# Altium footprint library STPMotorControl_1.PcbLib: 84 footprints (part 1 of 6)
Each footprint in its own frame and in the unit in brackets; x right, y up, seen from the top. Pads: shape width x height; smd on the part's side, far side on the other; paste and mask are expansions set on the pad; w line width, h text height; cw(c..) or ccw(c..) is an arc to the next point about the centre after c.
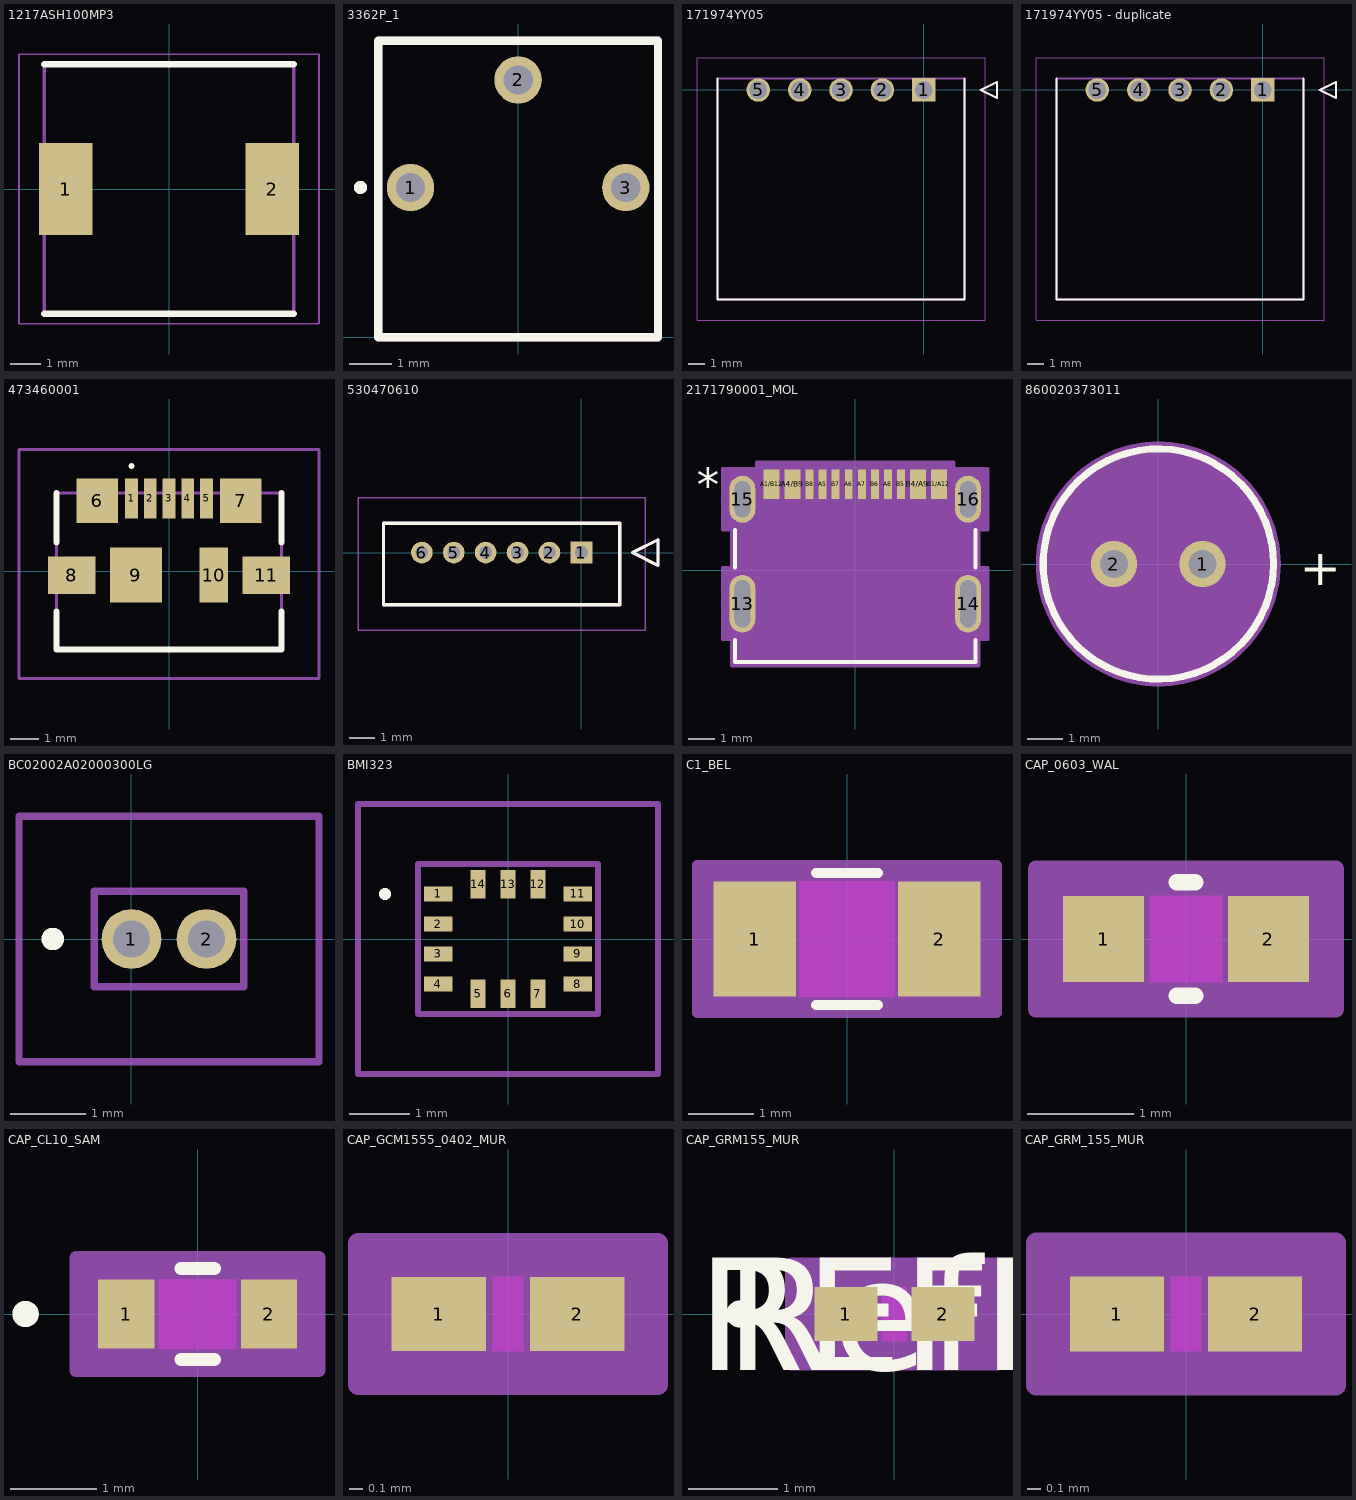
[diagram p0: the footprints below, top view; thin cyan lines are the x and y axes]

## 1217ASH100MP3 [mm]
pads (2):
  rect 1.75x3 smd: 1(-3.375,0) 2(3.375,0)
Top Overlay:
  lines w0.2: -4.075,-4.075 4.075,-4.075 ; -4.075,4.075 4.075,4.075
Mechanical 13:
  lines w0.1: -4.075,-4.075 -4.075,4.075 4.075,4.075 4.075,-4.075 -4.075,-4.075
Mechanical 15:
  lines w0.05: -4.9,-4.4 -4.9,4.4 4.9,4.4 4.9,-4.4 -4.9,-4.4
3D body "1217AS-H-150M=P3.stp": height 4.5, standoff 0.01, extent -4.33,-4.31 4.33,4.313

## 3362P_1 [mm]
pads (3):
  round 1.12 hole 0.69: 1(-2.54,3.53) 2(0,6.07) 3(2.54,3.53)
Top Overlay:
  circle w0.2: c-3.722,3.532 r0.057
  lines w0.2: -3.3,0 -3.3,6.99 3.3,6.99 3.3,0 -3.3,0
Mechanical 13:
  lines w0.2: -3.3,0 3.3,0 3.3,6.99 -3.3,6.99 -3.3,0
3D body "3362P-1-303LF.stp": height 4.65, standoff -4.85, extent -3.3,0 3.3,6.99

## 171974YY05 [mm]
pads (5):
  rect 1.44x1.44 hole 1.09: 1(0,0)
  round 1.44 hole 1.09: 2(-2.54,0) 3(-5.08,0) 4(-7.62,0) 5(-10.16,0)
Top Overlay:
  lines w0.127: -12.66,0.71 -12.66,-12.88 2.5,-12.88 2.5,0.71 ; 3.5,0 4.5,-0.5 4.5,0.5 3.5,0
Mechanical 13:
  lines w0.127: -12.66,-12.88 2.5,-12.88 2.5,0.71 -12.66,0.71 -12.66,-12.88 ; 3.5,0 4.5,-0.5 4.5,0.5 3.5,0
Mechanical 15:
  lines w0.05: -13.93,-14.15 3.77,-14.15 3.77,1.98 -13.93,1.98 -13.93,-14.15
3D body "1719740105.stp": height 7.28, standoff -3.39, extent -12.63,-12.88 2.53,0.71

## 171974YY05 - duplicate [mm]
pads (5):
  rect 1.44x1.44 hole 1.09: 1(0,0)
  round 1.44 hole 1.09: 2(-2.54,0) 3(-5.08,0) 4(-7.62,0) 5(-10.16,0)
Top Overlay:
  lines w0.127: -12.66,0.71 -12.66,-12.88 2.5,-12.88 2.5,0.71 ; 3.5,0 4.5,-0.5 4.5,0.5 3.5,0
Mechanical 13:
  lines w0.127: -12.66,-12.88 2.5,-12.88 2.5,0.71 -12.66,0.71 -12.66,-12.88 ; 3.5,0 4.5,-0.5 4.5,0.5 3.5,0
Mechanical 15:
  lines w0.05: -13.93,-14.15 3.77,-14.15 3.77,1.98 -13.93,1.98 -13.93,-14.15
3D body "1719740105.stp": height 7.28, standoff -3.39, extent -12.63,-12.88 2.53,0.71

## 473460001 [mm]
pads (11):
  rect 0.45x1.38 smd: 1(-1.3,2.525) 2(-0.65,2.525) 3(0,2.525) 4(0.65,2.525) 5(1.3,2.525)
  rect 1.425x1.55 smd: 6(-2.487,2.44) 7(2.487,2.44)
  rect 1.65x1.3 smd: 8(-3.375,-0.135) 11(3.375,-0.135)
  rect 1.8x1.9 smd: 9(-1.15,-0.135)
  rect 1x1.9 smd: 10(1.55,-0.135)
Top Overlay:
  lines w0.1: -1.3,3.6 ccw(c-1.3,3.65) -1.3,3.7 ; -1.3,3.6 cw(c-1.3,3.65) -1.3,3.7 ; -1.3,3.6 ccw(c-1.3,3.65) -1.3,3.7
  lines w0.2: -3.9,-1.4 -3.9,-2.715 3.9,-2.715 3.9,-1.4 ; -3.9,1 -3.9,2.715 ; 3.9,1 3.9,2.715
Mechanical 13:
  lines w0.1: -3.9,-2.715 -3.9,2.715 3.9,2.715 3.9,-2.715 -3.9,-2.715
Mechanical 15:
  lines w0.1: -5.2,-3.715 -5.2,4.215 5.2,4.215 5.2,-3.715 -5.2,-3.715
3D body "47346-0001.stp": height 2.72, standoff -0.22, extent -3.99,-3.26 3.99,2.17

## 530470610 [mm]
pads (6):
  rect 0.85x0.85 hole 0.5: 1(0,0)
  round 0.85 hole 0.5: 2(-1.25,0) 3(-2.5,0) 4(-3.75,0) 5(-5,0) 6(-6.25,0)
Top Overlay:
  lines w0.127: -7.75,-2.05 -7.75,1.15 1.5,1.15 1.5,-2.05 -7.75,-2.05 ; 2,0 3,0.5 3,-0.5 2,0
Mechanical 13:
  lines w0.127: -7.75,-2.05 -7.75,1.15 1.5,1.15 1.5,-2.05 -7.75,-2.05 ; 2,0 3,0.5 3,-0.5 2,0
Mechanical 15:
  lines w0.05: -8.75,-3.05 -8.75,2.15 2.5,2.15 2.5,-3.05 -8.75,-3.05
3D body "0530470610.stp": height 4.28, standoff -2.22, extent -7.755,-2.04 1.495,1.16

## 2171790001_MOL [mil]
pads (16):
  oval 39x87 hole 71 slot 24 at 0 deg paste-99999 mask-43.5: 13(-170.08,-50.07) 14(170.08,-50.07)
  oval 39x71 hole 55 slot 24 at 0 deg paste-99999 mask-35.5: 15(-170.08,107.41) 16(170.08,107.41)
  rect 24x45 smd paste+0 mask+0: A1/B12(-125.98,130.05) A4/B9(-94.49,130.05) B1/A12(125.98,130.05) B4/A9(94.49,130.05)
  rect 12x45 smd paste+0 mask+0: A5(-49.21,130.05) A6(-9.84,130.05) A7(9.84,130.05) A8(49.21,130.05) B5(68.9,130.05) B6(29.53,130.05) B7(-29.53,130.05) B8(-68.9,130.05)
Top Overlay:
  lines w6: -181,-104.79 -181,-138 181,-138 181,-104.79 ; -181,4.65 -181,60.69 ; 181,4.65 181,60.69
  text ".Designator" at -137.5,105.05 h50
  text "*" at -238.48,105.05 h50
Mechanical 13:
  lines w1: -176,-133 -176,133 176,133 176,-133 -176,-133
  text "*" at -238.48,105.05 h50
  text ".Designator" at -137.5,105.05 h50
Mechanical 15:
  region: -186,-103.57 -186,-143 186,-143 186,-103.57 199.58,-103.57 199.58,3.43 186,3.43 186,61.91 199.58,61.91 199.58,152.91 147.98,152.91 147.98,162.55 -147.98,162.55 -147.98,152.91 -199.58,152.91 -199.58,61.91 -186,61.91 -186,3.43 -199.58,3.43 -199.58,-103.57
  lines w6: -199.58,-103.57 -199.58,3.43 -186,3.43 -186,61.91 -199.58,61.91 -199.58,152.91 -147.98,152.91 -147.98,162.55 147.98,162.55 147.98,152.91 199.58,152.91 199.58,61.91 186,61.91 186,3.43 199.58,3.43 199.58,-103.57 186,-103.57 186,-143 -186,-143 -186,-103.57 -199.58,-103.57

## 860020373011 [mm]
pads (2):
  round 1.308 hole 0.8 mask+0.102: 1(1.25,0) 2(-1.25,0)
Top Overlay:
  circle w0.2: c0,0 r3.25
  text "+" at 4,-0.6 h1.02
Mechanical 13:
  circle w0.1: c0,0 r3.15
  text "+" at 4,-0.6 h1.02
Mechanical 15:
  region: 0.181,3.445 0.361,3.431 0.54,3.408 0.717,3.375 0.893,3.332 1.066,3.281 1.236,3.221 1.403,3.152 1.566,3.074 1.725,2.988 1.879,2.893 2.028,2.791 2.171,2.681 2.309,2.564 2.44,2.44 2.564,2.309 2.681,2.171 2.791,2.028 2.893,1.879 2.988,1.725 3.074,1.566 3.152,1.403 3.221,1.236 3.281,1.066 3.332,0.893 3.375,0.717 3.408,0.54 3.431,0.361 3.445,0.181 3.45,0 3.445,-0.181 3.431,-0.361 3.408,-0.54 3.375,-0.717 3.332,-0.893 3.281,-1.066 3.221,-1.236 3.152,-1.403 3.074,-1.566 2.988,-1.725 2.893,-1.879 2.791,-2.028 2.681,-2.171 2.564,-2.309 2.44,-2.44 2.309,-2.564 2.171,-2.681 2.028,-2.791 1.879,-2.893 1.725,-2.988 1.566,-3.074 1.403,-3.152 1.236,-3.221 1.066,-3.281 0.893,-3.332 0.717,-3.375 0.54,-3.408 0.361,-3.431 0.181,-3.445 0,-3.45 -0.181,-3.445 -0.361,-3.431 -0.54,-3.408 -0.717,-3.375 -0.893,-3.332 -1.066,-3.281 -1.236,-3.221 -1.403,-3.152 -1.566,-3.074 -1.725,-2.988 -1.879,-2.893 -2.028,-2.791 -2.171,-2.681 -2.309,-2.564 -2.44,-2.44 -2.564,-2.309 -2.681,-2.171 -2.791,-2.028 -2.893,-1.879 -2.988,-1.725 -3.074,-1.566 -3.152,-1.403 -3.221,-1.236 -3.281,-1.066 -3.332,-0.893 -3.375,-0.717 -3.408,-0.54 -3.431,-0.361 -3.445,-0.181 -3.45,0 -3.445,0.181 -3.431,0.361 -3.408,0.54 -3.375,0.717 -3.332,0.893 -3.281,1.066 -3.221,1.236 -3.152,1.403 -3.074,1.566 -2.988,1.725 -2.893,1.879 -2.791,2.028 -2.681,2.171 -2.564,2.309 -2.44,2.44 -2.309,2.564 -2.171,2.681 -2.028,2.791 -1.879,2.893 -1.725,2.988 -1.566,3.074 -1.403,3.152 -1.236,3.221 -1.066,3.281 -0.893,3.332 -0.717,3.375 -0.54,3.408 -0.361,3.431 -0.181,3.445 0,3.45
3D body "step_temp.STEP": height 10.89, standoff -20.11, extent -3.14,-3.15 3.144,3.138

## BC02002A02000300LG [mm]
pads (2):
  round 0.8 hole 0.5: 1(0,0) 2(1,0)
Top Overlay:
  lines w0.2: -1.1,0 ccw(c-1.05,0) -1,0 ; -1.1,0 cw(c-1.05,0) -1,0 ; -1.1,0 ccw(c-1.05,0) -1,0
Mechanical 13:
  lines w0.1: -0.5,-0.635 1.5,-0.635 1.5,0.635 -0.5,0.635 -0.5,-0.635
Mechanical 15:
  lines w0.1: -1.5,-1.635 2.5,-1.635 2.5,1.635 -1.5,1.635 -1.5,-1.635
3D body "BC020-02-A-0200-0300-L-G.stp": height 3, standoff -3, extent -0.5,-0.635 1.5,0.635

## BMI323 [mm]
pads (14):
  rect 0.475x0.25 smd: 1(-1.163,0.75) 2(-1.163,0.25) 3(-1.163,-0.25) 4(-1.163,-0.75) 8(1.163,-0.75) 9(1.163,-0.25) 10(1.163,0.25) 11(1.163,0.75)
  rect 0.25x0.475 smd: 5(-0.5,-0.913) 6(0,-0.913) 7(0.5,-0.913) 12(0.5,0.913) 13(0,0.913) 14(-0.5,0.913)
Top Overlay:
  lines w0.1: -2.1,0.75 ccw(c-2.05,0.75) -2,0.75 ccw(c-2.05,0.75) -2.1,0.75
Mechanical 13:
  lines w0.1: -1.5,-1.25 1.5,-1.25 1.5,1.25 -1.5,1.25 -1.5,-1.25
Mechanical 15:
  lines w0.1: -2.5,-2.25 2.5,-2.25 2.5,2.25 -2.5,2.25 -2.5,-2.25
3D body "BMI323.stp": height 0.84, standoff 0, extent -1.5,-1.25 1.5,1.25

## C1_BEL [mil]
pads (2):
  rect 50x70 smd paste+0 mask+0: 1(-56,0) 2(56,0)
Top Layer keep-out:
  region: -29,-33 -29,33 29,33 29,-33
Top Overlay:
  lines w6: -18.89,-40 18.89,-40 ; -18.89,40 18.89,40
  text ".Designator" at -137.5,-25 h50
Keep-Out Layer:
  region: -29,-35 -29,35 29,35 29,-35
Mechanical 13:
  lines w1: -67,-35 -67,35 ; -67,-35 67,-35 ; -67,-35 -31,-35 -31,35 -67,35 ; -67,-35 -67,35 ; -67,35 67,35 ; 67,-35 67,35 ; 67,-35 67,35 ; 67,-35 31,-35 31,35 67,35
  text ".Designator" at -137.5,-25 h50
Mechanical 15:
  region: 91,-45 -91,-45 -91,45 91,45
  lines w6: -91,-45 91,-45 91,45 -91,45 -91,-45
3D body "C1_BEL.step": height 30.98, standoff 0, extent -67.01,-35 67.01,35

## CAP_0603_WAL [mil]
pads (2):
  rect 30x32 smd paste+0 mask+0: 1(-30.5,0) 2(30.5,0)
Top Layer keep-out:
  region: -13.5,-14 -13.5,14 13.5,14 13.5,-14
Top Overlay:
  lines w6: -3.39,-21 3.39,-21 ; -3.39,21 3.39,21
Keep-Out Layer:
  region: -13.5,-16 -13.5,16 13.5,16 13.5,-16
Mechanical 13:
  lines w1: -31.5,-16 -31.5,16 ; -31.5,-16 31.5,-16 ; -31.5,-16 -15.5,-16 -15.5,16 -31.5,16 ; -31.5,-16 -31.5,16 ; -31.5,16 31.5,16 ; 31.5,-16 31.5,16 ; 31.5,-16 31.5,16 ; 31.5,-16 15.5,-16 15.5,16 31.5,16
Mechanical 15:
  region: 55.5,-26 -55.5,-26 -55.5,26 55.5,26
  lines w6: -55.5,-26 55.5,-26 55.5,26 -55.5,26 -55.5,-26
3D body "CAP_0603_WAL.step": height 32.01, standoff 0, extent -31.5,-15.98 31.5,15.98

## CAP_CL10_SAM [mm]
pads (2):
  rect 0.65x0.8 smd paste+0 mask+0: 1(-0.825,0) 2(0.825,0)
Top Layer keep-out:
  region: -0.449,-0.349 -0.449,0.349 0.449,0.349 0.449,-0.349
Top Overlay:
  circle w0.152: c-1.988,0 r0.076
  lines w0.152: -0.192,-0.527 0.192,-0.527 ; -0.192,0.527 0.192,0.527
  text ".Designator" at -3.492,-0.635 h1.27
Keep-Out Layer:
  region: -0.449,-0.4 -0.449,0.4 0.449,0.4 0.449,-0.4
Mechanical 13:
  circle w0.025: c-0.698,0 r0.076
  lines w0.025: -0.8,-0.4 -0.8,0.4 ; -0.8,-0.4 -0.5,-0.4 -0.5,0.4 -0.8,0.4 ; -0.8,-0.4 0.8,-0.4 ; -0.8,-0.4 -0.8,0.4 ; -0.8,0.4 0.8,0.4 ; 0.8,-0.4 0.5,-0.4 0.5,0.4 0.8,0.4 ; 0.8,-0.4 0.8,0.4 ; 0.8,-0.4 0.8,0.4
  text ".Designator" at -3.492,-0.635 h1.27
Mechanical 15:
  region: 1.404,-0.654 -1.404,-0.654 -1.404,0.654 1.404,0.654
  lines w0.152: -1.404,-0.654 -1.404,0.654 1.404,0.654 1.404,-0.654 -1.404,-0.654
3D body "CAP_CL10_SAM.step": height 0.9, standoff 0, extent -0.8,-0.4 0.8,0.4

## CAP_GCM1555_0402_MUR [mil]
pads (2):
  rect 28x22 smd paste+0 mask+0: 1(-20.5,0) 2(20.5,0)
Top Layer keep-out:
  region: -4.5,-9 -4.5,9 4.5,9 4.5,-9
Top Overlay:
  text ".Designator" at -137.5,-25 h50
Keep-Out Layer:
  region: -4.5,-11 -4.5,11 4.5,11 4.5,-11
Mechanical 13:
  lines w1: -20.5,-11 -20.5,11 ; -20.5,-11 20.5,-11 ; -20.5,-11 -6.5,-11 -6.5,11 -20.5,11 ; -20.5,-11 -20.5,11 ; -20.5,11 20.5,11 ; 20.5,-11 20.5,11 ; 20.5,-11 20.5,11 ; 20.5,-11 6.5,-11 6.5,11 20.5,11
  text ".Designator" at -137.5,-25 h50
Mechanical 15:
  region: 44.5,-21 -44.5,-21 -44.5,21 44.5,21
  lines w6: -44.5,-21 44.5,-21 44.5,21 -44.5,21 -44.5,-21
3D body "CAP_GCM1555_0402_MUR.step": height 22.01, standoff 0, extent -20.51,-10.98 20.51,10.98

## CAP_GRM155_MUR [mil]
pads (2):
  rect 28x24 smd paste+0 mask+0: 1(-21.5,0) 2(21.5,0)
Top Layer keep-out:
  region: -5.5,-10 -5.5,10 5.5,10 5.5,-10
Top Overlay:
  circle w6: c-68.5,0 r3
  text "RefDes" at -75,-25 h50
  text "REFDES" at -87.5,-25 h50
Keep-Out Layer:
  region: -5.5,-12 -5.5,12 5.5,12 5.5,-12
Mechanical 13:
  circle w0: c-16.5,0 r3
  lines w1: -21.5,-12 -21.5,12 ; -21.5,-12 -7.5,-12 -7.5,12 -21.5,12 ; -21.5,-12 21.5,-12 ; -21.5,-12 -21.5,12 ; -21.5,12 21.5,12 ; 21.5,-12 7.5,-12 7.5,12 21.5,12 ; 21.5,-12 21.5,12 ; 21.5,-12 21.5,12
  text "RefDes2" at -87.5,-25 h50
Mechanical 15:
  region: 45.5,-22 -45.5,-22 -45.5,22 45.5,22
  lines w6: -45.5,-22 -45.5,22 45.5,22 45.5,-22 -45.5,-22
3D body "CAP_GRM155_MUR.step": height 24.02, standoff 0, extent -21.5,-12.01 21.5,12.01

## CAP_GRM_155_MUR [mil]
pads (2):
  rect 27.78x22 smd paste+0 mask+0: 1(-20.39,0) 2(20.39,0)
Top Layer keep-out:
  region: -4.5,-9 -4.5,9 4.5,9 4.5,-9
Top Overlay:
  text ".Designator" at -137.5,-25 h50
Keep-Out Layer:
  region: -4.5,-11 -4.5,11 4.5,11 4.5,-11
Mechanical 13:
  lines w1: -20.5,-11 -20.5,11 ; -20.5,-11 -6.5,-11 -6.5,11 -20.5,11 ; -20.5,-11 20.5,-11 ; -20.5,-11 -20.5,11 ; -20.5,11 20.5,11 ; 20.5,-11 6.5,-11 6.5,11 20.5,11 ; 20.5,-11 20.5,11 ; 20.5,-11 20.5,11
  text ".Designator" at -137.5,-25 h50
Mechanical 15:
  region: 44.28,-21 -44.28,-21 -44.28,21 44.28,21
  lines w6: -44.28,-21 -44.28,21 44.28,21 44.28,-21 -44.28,-21
3D body "CAP_GRM_155_MUR.step": height 22.01, standoff 0, extent -20.51,-10.98 20.51,10.98